# Altium footprint library General_Lib.PcbLib: 26 footprints (part 1 of 2)
Each footprint in its own frame and in the unit in brackets; x right, y up, seen from the top. Pads: shape width x height; smd on the part's side, far side on the other; paste and mask are expansions set on the pad; w line width, h text height; cw(c..) or ccw(c..) is an arc to the next point about the centre after c.
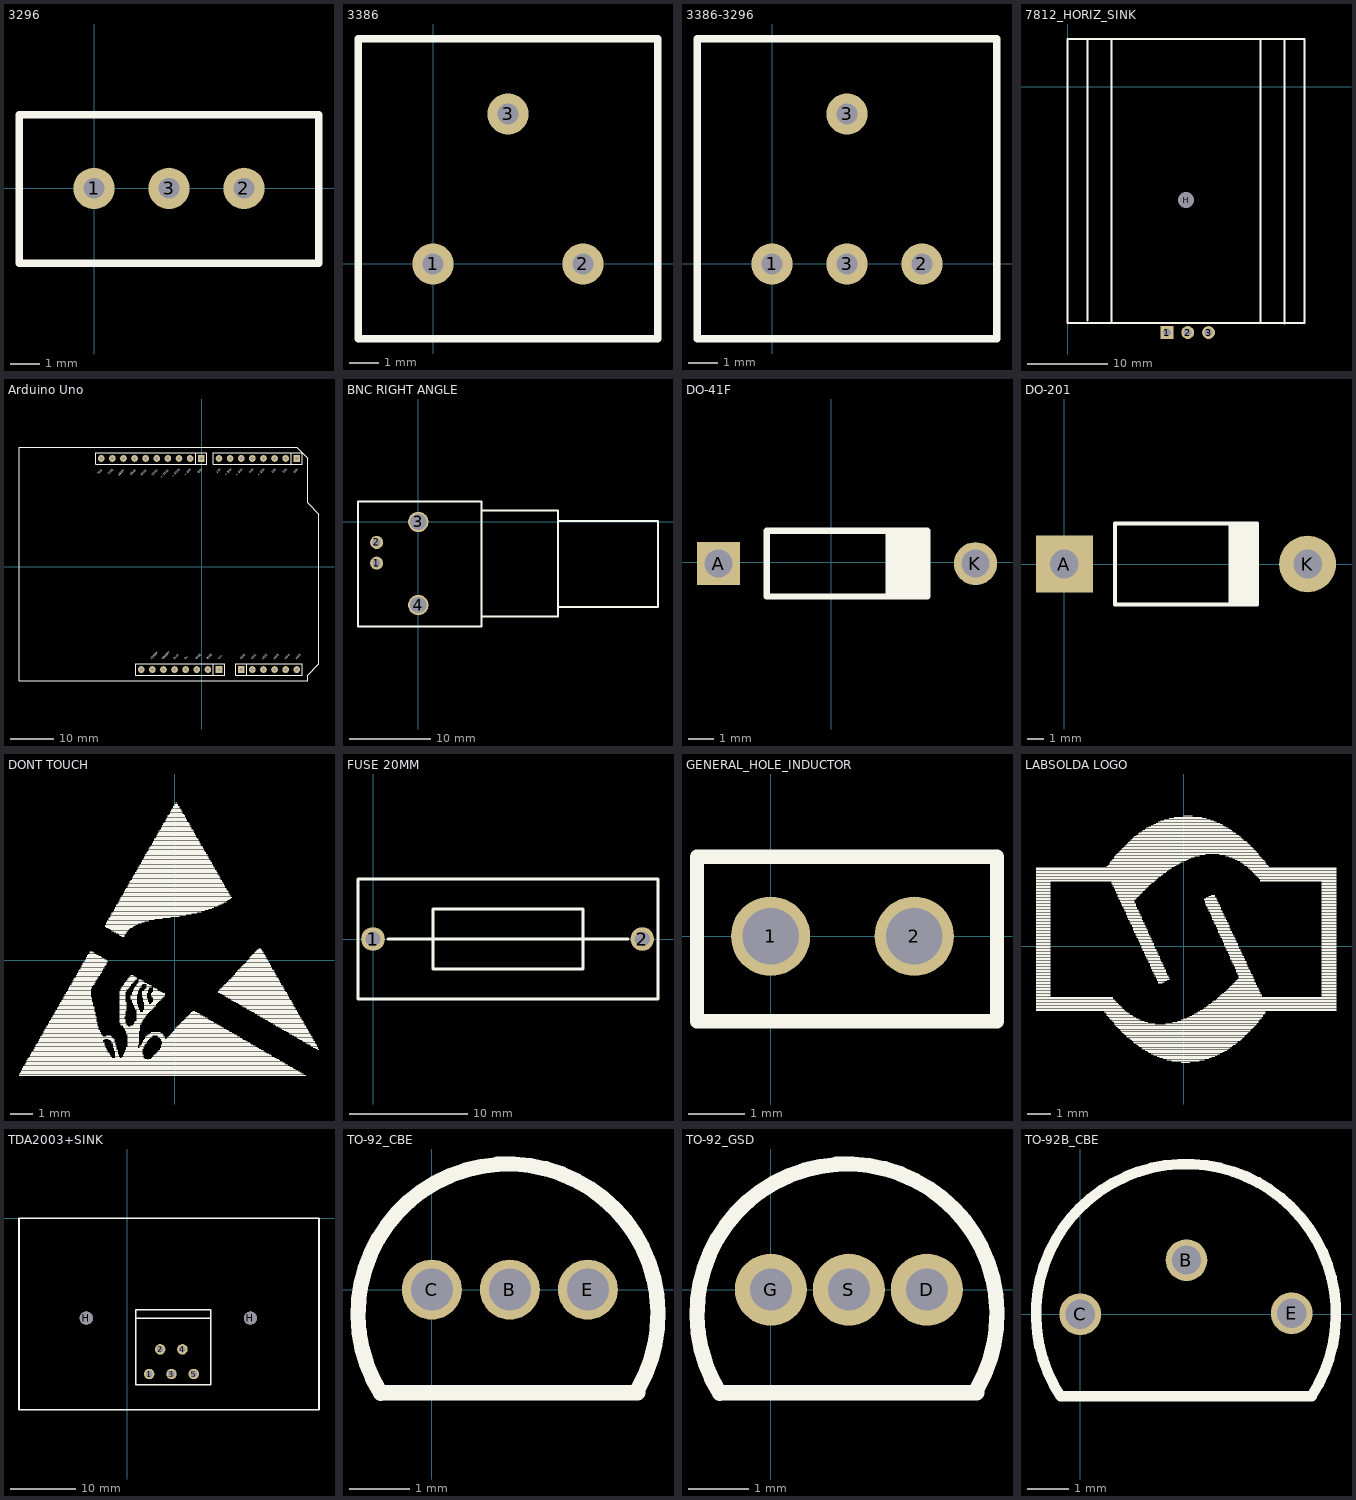
[diagram p0: the footprints below, top view; thin cyan lines are the x and y axes]

## 3296 [mm]
pads (3):
  round 1.4 hole 0.7 unplated: 1(0,0) 2(5.08,0) 3(2.54,0)
Top Overlay:
  lines w0.254: -2.54,-2.54 7.62,-2.54 7.62,2.5 -2.54,2.5 ; -2.54,-2.54 -2.54,2.5 ; -2.54,-2.54 -2.54,2.5
3D body "User Library-Potenciometro Vertical.step": height 12.46, standoff -5.04, extent -2.05,-2.425 7.15,2.375

## 3386 [mm]
pads (3):
  round 1.4 hole 0.7 unplated: 1(0,0) 2(5.08,0) 3(2.54,5.08)
Top Overlay:
  lines w0.254: -2.54,-2.54 7.62,-2.54 7.62,7.62 -2.54,7.62 ; -2.54,-2.54 -2.54,7.62 ; -2.54,-2.54 -2.54,7.62
3D body "3386.STEP": height 4.92, standoff -6, extent -2.288,-2.326 7.288,7.25

## 3386-3296 [mm]
pads (4):
  round 1.4 hole 0.7 unplated: 1(0,0) 2(5.08,0) 3(2.54,0) 3(2.54,5.08)
Top Overlay:
  lines w0.254: -2.54,-2.54 -2.54,7.62 ; -2.54,-2.54 -2.54,7.62 ; -2.54,-2.54 7.62,-2.54 7.62,7.62 -2.54,7.62
3D body "3386.STEP": height 4.92, standoff -6, extent -2.263,-2.276 7.313,7.3

## 7812_HORIZ_SINK [mm]
pads (4):
  rect 1.6x1.6 hole 1: 1(12.37,-30.632)
  round 1.6 hole 1: 2(14.97,-30.632) 3(17.57,-30.632)
  round 1.3 hole 2 unplated: H(14.77,-14.132)
Top Overlay:
  lines w0.254: 2.5,-29.134 2.5,5.944 ; 5.5,-29.337 5.5,5.944 ; 24.015,-29.312 24.015,5.766 ; 27.015,-29.515 27.015,5.766 ; 0,-29.413 0,5.944 29.515,5.944 29.515,-29.388 29.489,-29.413 12.217,-29.413 0,-29.413
3D body "sink to220.stp": height 11, standoff -1, extent 0.27,-29.232 29.27,5.768
3D body "to-220_HORIZ.step": height 6.05, standoff -0.19, extent 9.89,-30.832 20.05,-11.552

## Arduino Uno [mil]
pads (32):
  rect 60x60 hole 30: 0(854.92,975) 8(-5.08,975) A0(354.92,-925) VIN(154.92,-925)
  round 60 hole 30: 1(754.92,975) 2(654.92,975) 3(554.92,975) 3.3V(-245.08,-925) 4(454.92,975) 5(354.92,975) 5V(-445.08,-925) 5V(-145.08,-925) 6(254.92,975) 7(154.92,975) 9(-105.08,975) 10(-205.08,975) 11(-305.08,975) 12(-405.08,975) 13(-505.08,975) A1(454.92,-925) A2(554.92,-925) A3(654.92,-925) A4(754.92,-925) A5(854.92,-925) AREF(-705.08,975) GND(-605.08,975) GND(-45.08,-925) GND(54.92,-925) NA(-545.08,-925) RES(-345.08,-925) SCL(-905.08,975) SDA(-805.08,975)
Top Overlay:
  lines w5: -1645.08,-1025 954.92,-1025 954.92,-975 1054.92,-875 1054.92,475 954.92,575 954.92,975 854.92,1075 -1645.08,1075 -1645.08,-1025
  lines w10: 104.92,-975 104.92,-875 ; 804.92,925 804.92,1025 ; -55.08,925 44.92,925 44.92,1025 -55.08,1025 ; -55.08,925 -55.08,1025 ; -55.08,925 -955.08,925 -955.08,1025 -55.08,1025 ; 404.92,-975 904.92,-975 904.92,-875 404.92,-875 ; 404.92,-975 404.92,-875 ; 404.92,-975 304.92,-975 304.92,-925 304.92,-875 404.92,-875 ; -595.08,-975 204.92,-975 204.92,-875 -595.08,-875 -595.08,-975 ; 104.92,925 904.92,925 904.92,1025 104.92,1025 104.92,925
  text "SCL" at -905.08,877.93 h20
  text "SDA" at -805.08,882.93 h20
  text "IOREF" at -450.08,-837.93 h20
  text "RESET" at -345.08,-837.93 h20
  text "3v3" at -245.08,-837.93 h20
  text "5v" at -145.08,-837.93 h20
  text "GND" at -45.08,-837.93 h20
  text "GND" at 54.92,-837.93 h20
  text "Vin" at 154.92,-837.93 h20
  text "AD0" at 354.92,-837.93 h20
  text "AD1" at 454.92,-837.93 h20
  text "AD2" at 554.92,-837.93 h20
  text "AD3" at 654.92,-837.93 h20
  text "AD4" at 754.92,-837.93 h20
  text "AD5" at 854.92,-837.93 h20
  text "IO0" at 859.92,887.93 h20
  text "IO1" at 759.92,887.93 h20
  text "IO2" at 659.92,887.93 h20
  text "IO3 ~" at 559.92,887.93 h20
  text "IO4" at 459.92,887.93 h20
  text "IO5 ~" at 359.92,887.93 h20
  text "IO6 ~" at 259.92,887.93 h20
  text "IO7" at 159.92,887.93 h20
  text "IO8" at -5.08,885 h20
  text "IO9 ~" at -105.08,885 h20
  text "IO10 ~" at -205.08,885 h20
  text "IO11 ~" at -305.08,877.93 h20
  text "IO12" at -405.08,877.93 h20
  text "IO13" at -505.08,877.93 h20
  text "GND" at -605.08,877.93 h20
  text "AREF" at -705.08,877.93 h20

## BNC RIGHT ANGLE [mm]
pads (4):
  round 1.6 hole 1: 1(-5.105,-5.055) 2(-5.105,-2.515)
  round 2.5 hole 2: 3(0,0) 4(0,-10.185)
Top Overlay:
  lines w0.254: 7.722,-11.582 17.12,-11.582 17.12,1.397 7.722,1.397 ; 17.12,-10.439 29.362,-10.439 29.362,0.127 17.17,0.127 ; -7.391,-12.802 7.722,-12.802 7.722,2.489 -7.391,2.489 -7.391,-12.802
3D body "COAXIAL RIGHT.STEP": height 17.65, standoff -2.45, extent -7.097,-12.428 28.403,2.272

## DO-41F [mm]
pads (2):
  rect 1.7x1.7 hole 1.1: A(-4.457,-0.055)
  round 1.7 hole 1.1: K(5.703,-0.055)
Top Overlay:
  rectangle: 2.147,-1.385 3.798,1.215
  lines w0.254: -2.552,-1.355 -2.552,1.245 3.798,1.245 3.798,-1.355 -2.552,-1.355
3D body "DO-41-PLASTIC.STEP": height 2.84, standoff -2.51, extent -4.838,-1.452 6.182,1.248

## DO-201 [mil]
pads (2):
  rect 140x140 hole 70.87: A(0,0)
  round 140 hole 70.87: K(600,0)
Top Overlay:
  rectangle: 405,-100 475,100
  lines w10: 125,-100 475,-100 475,100 125,100 125,-100
3D body "DO-201AD.step": height 239.21, standoff -217.48, extent -25,-110.24 626.97,110.24

## DONT TOUCH [mm]
Top Overlay:
  drawing of 557 lines, arcs and shapes, not listed

## FUSE 20MM [mm]
pads (2):
  round 2 hole 1.3: 1(0,0) 2(22.8,0)
Top Overlay:
  lines w0.254: 1.27,0 21.59,0 ; -1.27,-5.08 -1.27,5.08 24.13,5.08 24.13,-5.08 -1.27,-5.08 ; 5.08,-2.54 5.08,2.54 17.78,2.54 17.78,-2.54 5.08,-2.54
3D body "User Library-5x20mm PCB Fuse Holder Assy_ 1.STEP": height 14.97, standoff -3.38, extent -0.679,-4.5 23.571,4.5

## GENERAL_HOLE_INDUCTOR [mm]
pads (2):
  round 1.4 hole 1: 1(0,0) 2(2.54,0)
Top Overlay:
  lines w0.254: -1.3,-1.5 4,-1.5 4,1.4 -1.3,1.4 -1.3,-1.5

## LABSOLDA LOGO [mm]
Top Overlay:
  drawing of 518 lines, arcs and shapes, not listed

## TDA2003+SINK [mm]
pads (7):
  round 1.6 hole 1: 1(3.327,-23.749) 2(5,-20) 3(6.727,-23.749) 4(8.4,-20) 5(10.127,-23.749)
  round 2 hole 2: H(-6.254,-15.24) H(18.746,-15.24)
Top Overlay:
  lines w0.254: 1.27,-15.24 1.27,-13.97 12.7,-13.97 12.7,-15.24 ; 1.27,-15.24 12.7,-15.24 ; 1.27,-15.24 1.27,-24.13 1.27,-25.4 12.7,-25.4 12.7,-15.24 ; -16.51,-29.21 -16.51,0 29.21,0 29.21,-29.21 -16.51,-29.21
3D body "User Library-DISS-ML97.STEP": height 38.96, standoff 0.85, extent -14.42,-27.508 27.679,-2.464
3D body "SW3dPS-TO220-5.STEP": height 22.35, standoff -1.64, extent 1.626,-23.978 11.786,-15.738

## TO-92_CBE [mm]
pads (3):
  round 1 hole 0.7: B(1.3,0) C(0,0) E(2.6,0)
Top Overlay:
  lines w0.254: -0.853,-1.727 cw(c1.27,-0.406) 3.433,-1.661 ; -0.853,-1.718 3.433,-1.718
3D body "TO-92A.step": height 10, standoff -1, extent -1.1,-1.53 3.7,2.4

## TO-92_GSD [mm]
pads (3):
  round 1.2 hole 0.7: D(2.6,0) G(0,0) S(1.3,0)
Top Overlay:
  lines w0.254: -0.853,-1.727 cw(c1.27,-0.406) 3.433,-1.661 ; -0.853,-1.718 3.433,-1.718
3D body "TO-92A.step": height 10, standoff -1, extent -1.1,-1.53 3.7,2.4

## TO-92B_CBE [mm]
pads (3):
  round 1 hole 0.7: B(2.55,1.3) C(0,0) E(5.075,0.025)
Top Overlay:
  lines w0.254: -0.47,-1.971 cw(c2.539,0.007) 5.551,-1.964 -0.47,-1.971
3D body "ALSRobot-TO-92B.step": height 7.34, standoff -0.7, extent -0.29,-1.4 5.39,2.4